# Altium schematic symbol library MIC5319-3P3YD5-TR.SchLib: 1 symbol
Pins are listed as number, name and electrical type; pins without a type are passive.

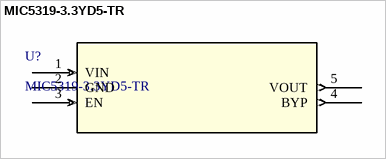
[diagram p0: symbol MIC5319-3.3YD5-TR]

## MIC5319-3.3YD5-TR
designator U?
Description; Manufacturer_Name: Microchip; Copyright: Copyright (C) 2025 Ultra Librarian. All rights reserved.; Manufacturer_Part_Number: MIC5319-3.3YD5-TR; RefDes: RefDes; Type: Type
footprint TSOT-23-5_D5_MCH
pins: 1 VIN (in), 2 GND (power), 3 EN (in), 4 BYP (out), 5 VOUT (out)